# Altium footprint library sop-4.PcbLib: 1 footprints
Each footprint in its own frame and in the unit in brackets; x right, y up, seen from the top. Pads: shape width x height; smd on the part's side, far side on the other; paste and mask are expansions set on the pad; w line width, h text height; cw(c..) or ccw(c..) is an arc to the next point about the centre after c.
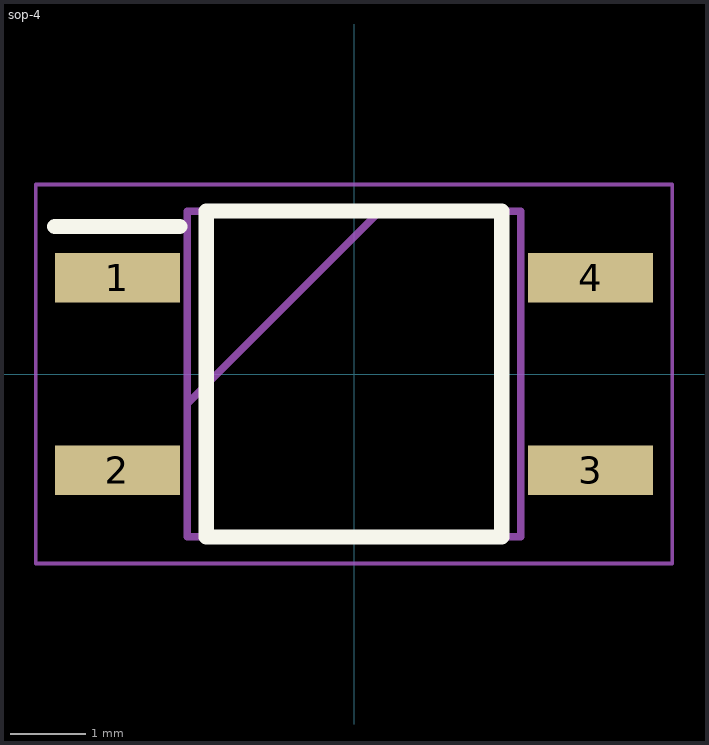
[diagram p0: the footprint, top view; thin cyan lines are the x and y axes]

## sop-4 [mm]
pads (4):
  rect 1.65x0.65 smd: 1(-3.125,1.27) 2(-3.125,-1.27) 3(3.125,-1.27) 4(3.125,1.27)
Top Overlay:
  lines w0.2: -3.95,1.945 -2.3,1.945 ; -1.95,-2.15 -1.95,2.15 1.95,2.15 1.95,-2.15 -1.95,-2.15
Mechanical 13:
  lines w0.1: -2.2,-0.39 0.34,2.15 ; -2.2,-2.15 -2.2,2.15 2.2,2.15 2.2,-2.15 -2.2,-2.15
Mechanical 15:
  lines w0.05: -4.2,-2.5 -4.2,2.5 4.2,2.5 4.2,-2.5 -4.2,-2.5
3D body "AQY-412S.stp": height 2.11, standoff 0.01, extent -3.4,-2.15 3.4,2.15